# Altium schematic symbol library SensorAnalog.SchLib: 11 symbols
Pins are listed as number, name and electrical type; pins without a type are passive.

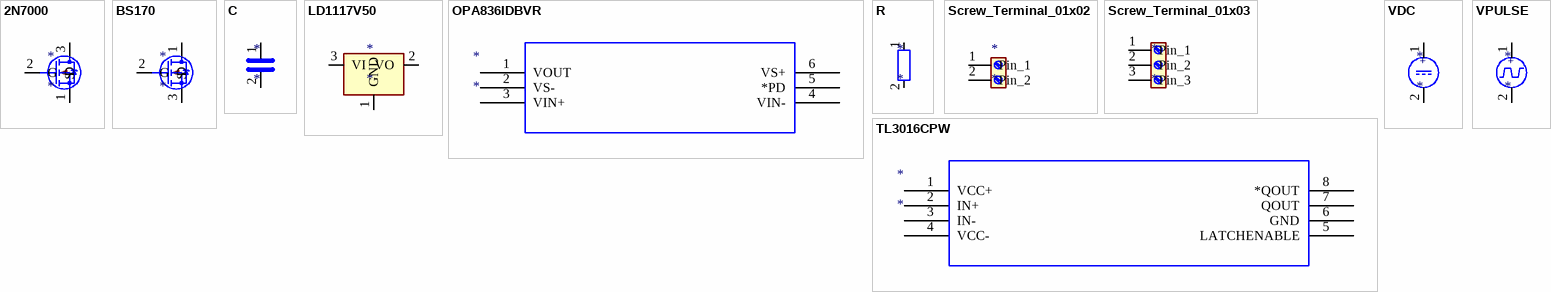
[diagram p0: symbols 2N7000 to VPULSE]

## 2N7000
designator *
pins: 1 S, 2 G, 3 D

## BS170
designator *
pins: 1 D, 2 G, 3 S

## C
designator *
pins: 1, 2

## LD1117V50
designator *
pins: 1 GND, 2 VO, 3 VI

## OPA836IDBVR
designator *
pins: 1 VOUT, 2 VS-, 3 VIN+, 4 VIN-, 5 *PD, 6 VS+

## R
designator *
pins: 1, 2

## Screw_Terminal_01x02
designator *
pins: 1 Pin_1, 2 Pin_2

## Screw_Terminal_01x03
designator *
pins: 1 Pin_1, 2 Pin_2, 3 Pin_3

## TL3016CPW
designator *
pins: 1 VCC+, 2 IN+, 3 IN-, 4 VCC-, 5 LATCHENABLE, 6 GND, 7 QOUT, 8 *QOUT

## VDC
designator *
pins: 1, 2
text: +

## VPULSE
designator *
pins: 1, 2
text: +